# Altium footprint library PBL - THD Packages.PcbLib: 160 footprints (part 9 of 10)
Each footprint in its own frame and in the unit in brackets; x right, y up, seen from the top. Pads: shape width x height; smd on the part's side, far side on the other; paste and mask are expansions set on the pad; w line width, h text height; cw(c..) or ccw(c..) is an arc to the next point about the centre after c.
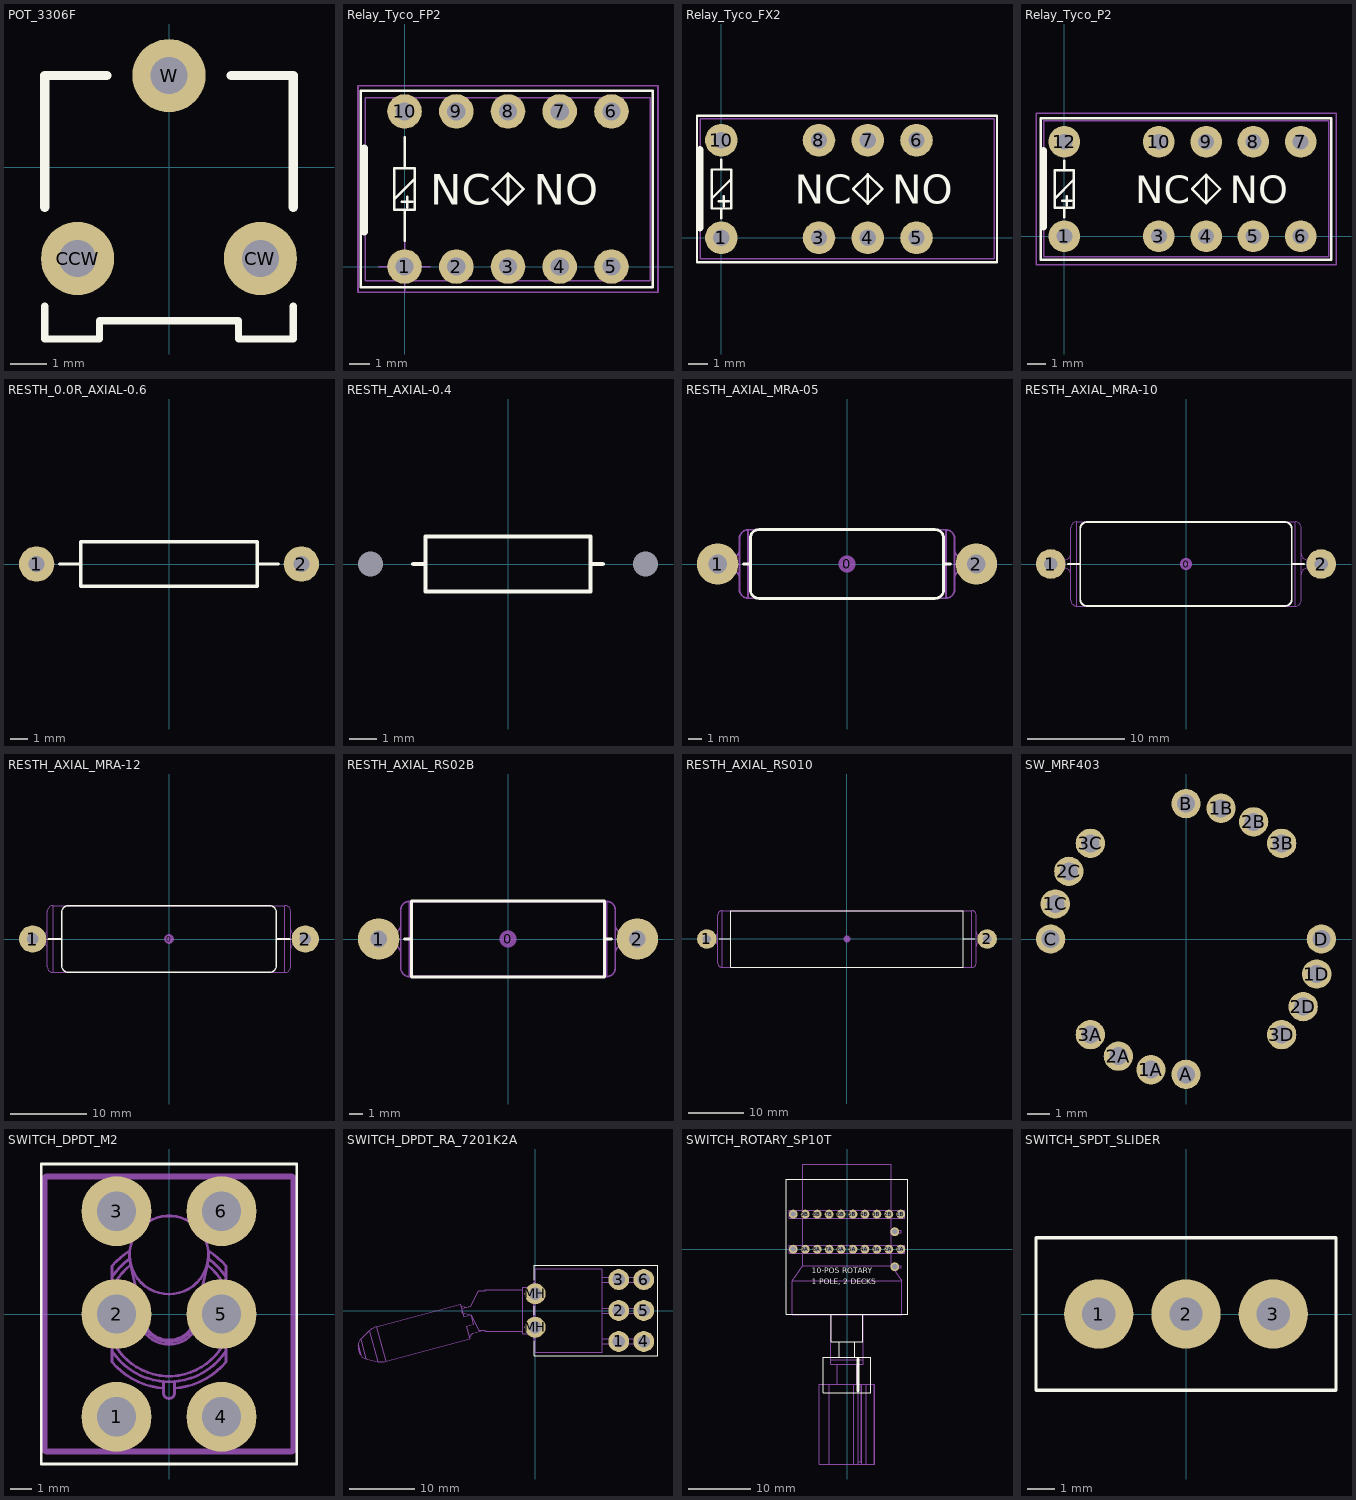
[diagram p8: the footprints below, top view; thin cyan lines are the x and y axes]

## POT_3306F [mm]
pads (3):
  round 2 hole 1.016: CCW(-2.5,-2.5) CW(2.5,-2.5) W(0,2.5)
Top Overlay:
  lines w0.2: -3.4,-3.8 -3.4,-4.7 -1.9,-4.7 -1.9,-4.2 0,-4.2 1.9,-4.2 1.9,-4.7 3.4,-4.7 3.4,-3.8
  lines w0.254: -3.4,-1.1 -3.4,2.5 -1.7,2.5 ; 1.7,2.5 3.4,2.5 3.4,-1.1
3D body: height 7.62, standoff -3.04, extent -3.405,-4.876 3.405,3.79

## Relay_Tyco_FP2 [mm] "Tyco FP2 DPDT 5VDC Relay"
height 5.1
pads (10):
  round 1.7 hole 0.889: 1(0,0) 2(2.54,0) 3(5.08,0) 4(7.62,0) 5(10.16,0) 6(10.16,7.62) 7(7.62,7.62) 8(5.08,7.62) 9(2.54,7.62) 10(0,7.62)
Top Overlay:
  lines w0.127: -0.508,3.302 0.508,4.318 ; -0.127,3.175 0.381,3.175 ; 0,1.27 0,2.794 ; 0,4.826 0,6.35 ; 0.127,2.921 0.127,3.429 ; 5.08,3.048 5.842,3.81 5.08,4.572 ; 5.08,3.048 5.08,4.572 ; 5.08,3.048 4.318,3.81 5.08,4.572 ; -2.159,-1.016 12.192,-1.016 12.192,8.636 -2.159,8.636 -2.159,-1.016 ; -0.508,2.794 -0.508,4.826 0.508,4.826 0.508,2.794 -0.508,2.794
  lines w0.381: -1.981,1.727 -1.981,5.817
  text "NO" at 6.35,3.048 h1.5
  text "NC" at 1.27,3.048 h1.5
13 - 3D Top Side:
  lines w0.076: -1.93,-0.7 -1.93,8.3 12.07,8.3 12.07,-0.7 -1.93,-0.7
15 - Top Courtyards:
  lines w0.076: -1.27,0 1.27,0 ; 0,-1.27 0,1.27 ; -2.286,-1.27 -2.286,8.89 12.446,8.89 12.446,-1.27 -2.286,-1.27
3D body: height 5, standoff 0.3, extent -1.93,-0.7 12.07,8.3

## Relay_Tyco_FX2 [mm] "Tyco FX2 DPDT 5VDC Relay"
height 10.7
pads (8):
  round 1.7 hole 0.85: 1(0,0) 3(5.08,0) 4(7.62,0) 5(10.16,0) 6(10.16,5.08) 7(7.62,5.08) 8(5.08,5.08) 10(0,5.08)
Top Overlay:
  lines w0.127: -0.508,2.032 0.508,3.048 ; -0.127,1.905 0.381,1.905 ; 0,1.016 0,1.524 ; 0,3.556 0,4.064 ; 0.127,1.651 0.127,2.159 ; 7.62,1.778 8.382,2.54 7.62,3.302 ; 7.62,1.778 7.62,3.302 ; 7.62,1.778 6.858,2.54 7.62,3.302 ; -1.27,-1.27 14.351,-1.27 14.351,6.35 -1.27,6.35 -1.27,-1.27 ; -0.508,1.524 -0.508,3.556 0.508,3.556 0.508,1.524 -0.508,1.524
  lines w0.381: -1.118,0.508 -1.118,4.597
  text "NO" at 8.89,1.778 h1.5
  text "NC" at 3.81,1.778 h1.5
13 - 3D Top Side:
  lines w0.076: -1.1,-1.1 14.2,-1.1 14.2,6.2 -1.1,6.2 -1.1,-1.1
3D body: height 10.7, standoff 0, extent -1.1,-1.1 14.2,6.2

## Relay_Tyco_P2 [mm] "Tyco P2 DPDT 5VDC V23079 Relay"
height 10
pads (10):
  round 1.7 hole 0.85: 1(0,0) 3(5.08,0) 4(7.62,0) 5(10.16,0) 6(12.7,0) 7(12.7,5.08) 8(10.16,5.08) 9(7.62,5.08) 10(5.08,5.08) 12(0,5.08)
Top Overlay:
  lines w0.127: -0.508,2.032 0.508,3.048 ; -0.127,1.905 0.381,1.905 ; 0,1.016 0,1.524 ; 0,3.556 0,4.064 ; 0.127,1.651 0.127,2.159 ; 7.62,1.778 6.858,2.54 7.62,3.302 ; 7.62,1.778 7.62,3.302 ; 7.62,1.778 8.382,2.54 7.62,3.302 ; -1.27,-1.27 -1.27,6.35 14.351,6.35 14.351,-1.27 -1.27,-1.27 ; -0.508,1.524 0.508,1.524 0.508,3.556 -0.508,3.556 -0.508,1.524
  lines w0.381: -1.118,0.508 -1.118,4.597
  text "NC" at 3.81,1.778 h1.5
  text "NO" at 8.89,1.778 h1.5
13 - 3D Top Side:
  lines w0.076: -1.1,-1.1 -1.1,6.2 14.2,6.2 14.2,-1.1 -1.1,-1.1
15 - Top Courtyards:
  lines w0.076: -0.762,0 0.762,0 ; 0,-0.762 0,0.762 ; -1.524,-1.524 -1.524,6.604 14.6,6.604 14.6,-1.524 -1.524,-1.524
3D body: height 9.82, standoff -0.58, extent -0.9,-1.14 13.6,6.26
3D body: height 10.7, standoff 0, extent -1.1,-1.1 14.2,6.2

## RESTH_0.0R_AXIAL-0.6 [mil] "Axial Resistor 0 Ohm, Thru-Hole; 2 Leads; 0.6 in Pin Spacing"
height 102.36
pads (2):
  round 80 hole 36: 1(-300,0) 2(300,0)
Top Overlay:
  lines w7.87: -248.03,0 -200,0 ; 200,0 248.03,0 ; -200,-50 200,-50 200,50 -200,50 -200,-50
3D body: height 102.76, standoff -98.43, extent -311.8,-51.57 311.82,51.58

## RESTH_AXIAL-0.4 [mil]
height 80
pads (2):
  round 0 / inner round 0 / far side round 100 hole 36 unplated: 1(-200,0) 2(200,0)
Top Overlay:
  lines w6: -137.8,0 -120,0 ; 120,0 137.8,0 ; -120,-40 120,-40 120,40 -120,40 -120,-40
3D body: height 102.23, standoff -100, extent -211.81,-50.27 211.81,50.27

## RESTH_AXIAL_MRA-05 [mil] "MRA-05 Axial Resistor Thru-Hole; 2 Leads"
height 198
pads (3):
  round 50 on Mech15: 0(0,0)
  round 120 hole 54: 1(-375,0) 2(375,0)
Top Overlay:
  lines w7.87: -300,0 -280,0 ; 280,0 300,0 ; -280,-75 ccw(c-255,-75) -255,-100 255,-100 ccw(c255,-75) 280,-75 280,75 ccw(c255,75) 255,100 -255,100 ccw(c-255,75) -280,75 -280,-75
13 - 3D Top Side:
  lines w5: -337,-16.89 -337,17 ; -312,-42 ccw(c-337,-42) -337,-17 -375,-17 cw(c-375,0) -375,17 -337,17 ; -312,42 cw(c-337,42) -337,17 ; 312,-42 cw(c337,-42) 337,-17 ; 312,42 ccw(c337,42) 337,17 375,17 cw(c375,0) 375,-17 337,-17 ; 337,16.89 337,-17 ; -341,-16.98 -341,-16.52 -341,-15.46 -341,-13.85 -341,-11.73 -341,-9.19 -341,-6.32 -341,-3.22 -341,0 -341,3.22 -341,6.32 -341,9.19 -341,11.73 -341,13.85 -341,15.46 -341,16.52 -341,16.98 ; -341,-17 -341,-16.98 ; -341,16.98 -341,17 ; -287,-99 cw(c-287,-74) -312,-74 -312,74 cw(c-287,74) -287,99 ; -287,-99 -287,99 ; -287,-99 287,-99 ; -287,99 287,99 ; 287,-99 ccw(c287,-74) 312,-74 312,74 ccw(c287,74) 287,99 ; 287,-99 287,99 ; 341,-16.98 341,-16.52 341,-15.46 341,-13.85 341,-11.73 341,-9.19 341,-6.32 341,-3.22 341,0 341,3.22 341,6.32 341,9.19 341,11.73 341,13.85 341,15.46 341,16.52 341,16.98 ; 341,-17 341,-16.98 ; 341,16.98 341,17
3D body: height 197.22, standoff -100, extent -391.99,-98.8 392.01,98.81

## RESTH_AXIAL_MRA-10 [mil] "MRA-10 Axial Resistor Thru-Hole; 2 Leads"
height 343
pads (3):
  round 50 on Mech15: 0(0,0)
  round 120 hole 54: 1(-550,0) 2(550,0)
Top Overlay:
  lines w7.87: -480,0 -430,0 ; 430,0 480,0 ; -430,-145 ccw(c-405,-145) -405,-170 405,-170 ccw(c405,-145) 430,-145 430,145 ccw(c405,145) 405,170 -405,170 ccw(c-405,145) -430,145 -430,-145
13 - 3D Top Side:
  lines w5: -516,-17 -516,17 ; -493.5,-16.89 -493.5,17 ; -468.5,-42 ccw(c-493.5,-42) -493.5,-17 -550,-17 cw(c-550,0) -550,17 -493.5,17 ; -468.5,42 cw(c-493.5,42) -493.5,17 ; 468.5,-42 cw(c493.5,-42) 493.5,-17 ; 468.5,42 ccw(c493.5,42) 493.5,17 550,17 cw(c550,0) 550,-17 493.5,-17 ; 493.5,16.89 493.5,-17 ; 516,-17 516,17 ; -443.5,-171.5 cw(c-443.5,-146.5) -468.5,-146.5 -468.5,146.5 cw(c-443.5,146.5) -443.5,171.5 ; -443.5,-171.5 -443.5,171.5 ; -443.5,-171.5 443.5,-171.5 ; -443.5,171.5 443.5,171.5 ; 443.5,-171.5 ccw(c443.5,-146.5) 468.5,-146.5 468.5,146.5 ccw(c443.5,146.5) 443.5,171.5 ; 443.5,-171.5 443.5,171.5
3D body: height 341.65, standoff -100, extent -566.99,-171.16 567,171.17

## RESTH_AXIAL_MRA-12 [mil] "MRA-12 Axial Resistor Thru-Hole; 2 Leads"
height 343
pads (3):
  round 50 on Mech15: 0(0,0)
  round 140 hole 60: 1(-700,0) 2(700,0)
Top Overlay:
  lines w7.87: -620,0 -550,0 ; 550,0 620,0 ; -550,-139.99 ccw(c-520,-139.99) -520,-169.99 520,-170 ccw(c519.99,-139.99) 549.99,-139.99 550,140 ccw(c519.99,140) 519.99,170 -520,170 ccw(c-520,140) -550,140 -550,-140
13 - 3D Top Side:
  lines w5: -666,-17 -666,17 ; -625,-47 ccw(c-655,-47) -655,-17 ; -625,47 cw(c-655,47) -655,17 ; 625,-47 cw(c655,-47) 655,-17 ; 625,47 ccw(c655,47) 655,17 ; 666,-17 666,17 ; -655,-17 -655,17 ; -655,-17 -700,-17 cw(c-700,0) -700,17 -655,17 ; -595,-171.5 cw(c-595,-141.5) -625,-141.5 -625,141.5 cw(c-595,141.5) -595,171.5 ; -595,-171.5 -595,171.5 ; -595,-171.5 595,-171.5 ; -595,171.5 595,171.5 ; 595,-171.5 ccw(c595,-141.5) 625,-141.5 625,141.5 ccw(c595,141.5) 595,171.5 ; 595,-171.5 595,171.5 ; 655,-17 655,17 ; 655,-17 700,-17 ccw(c700,0) 700,17 655,17
3D body: height 341.65, standoff -100, extent -717,-171.15 717,171.17

## RESTH_AXIAL_RS02B [mil] "Axial Resistor Thru-Hole; 2 Leads"
height 218
pads (3):
  round 50 on Mech15: 0(0,0)
  round 120 hole 48: 1(-375,0) 2(375,0)
Top Overlay:
  lines w7.87: -300,0 -280,0 ; 280,0 300,0 ; -280,-110 280,-110 280,110 -280,110 -280,-110
13 - 3D Top Side:
  lines w5: -341,-17 -341,17 ; -311,-42 ccw(c-336,-42) -336,-17 ; -311,42 cw(c-336,42) -336,17 ; 311,-42 cw(c336,-42) 336,-17 ; 311,42 ccw(c336,42) 336,17 ; 341,-17 341,17 ; -336,-17 -336,17 ; -336,-17 -375,-17 cw(c-375,0) -375,17 -336,17 ; -286,-109 cw(c-286,-84) -311,-84 -311,84 cw(c-286,84) -286,109 ; -286,-109 -286,109 ; -286,-109 286,-109 ; -286,109 286,109 ; 286,-109 ccw(c286,-84) 311,-84 311,84 ccw(c286,84) 286,109 ; 286,-109 286,109 ; 336,-17 336,17 ; 336,-17 375,-17 ccw(c375,0) 375,17 336,17
3D body: height 217.14, standoff -100, extent -392,-108.78 392,108.79

## RESTH_AXIAL_RS010 [mil] "Axial Resistor Thru-Hole; 2 Leads"
height 406
pads (3):
  round 50 on Mech15: 0(0,0)
  round 140 hole 60: 1(-1000,0) 2(1000,0)
Top Overlay:
  lines w7.87: -910,0 -830,0 ; 830,0 910,0 ; -830,-200 -830,200 830,200 830,-200 -830,-200
13 - 3D Top Side:
  lines w5: -958,-21 -958,21 ; -921,-51 ccw(c-951,-51) -951,-21 ; -921,51 cw(c-951,51) -951,21 ; 921,-51 cw(c951,-51) 951,-21 ; 921,51 ccw(c951,51) 951,21 ; 958,-21 958,21 ; -951,-21 -1000,-21 cw(c-1000,0) -1000,21 -951,21 ; -951,-21 -951,21 ; -891,-203 cw(c-891,-173) -921,-173 -921,173 cw(c-891,173) -891,203 ; -891,-203 891,-203 ; -891,-203 -891,203 ; -891,203 891,203 ; 891,-203 ccw(c891,-173) 921,-173 921,173 ccw(c891,173) 891,203 ; 891,-203 891,203 ; 951,-21 1000,-21 ccw(c1000,0) 1000,21 951,21 ; 951,-21 951,21
3D body: height 404.4, standoff -100, extent -1020.99,-202.59 1021,202.61

## SW_MRF403 [mm]
height 8.2
pads (16):
  round 1.3 hole 0.8: 1A(-1.553,-5.796) 1B(1.553,5.796) 1C(-5.796,1.553) 1D(5.796,-1.553) 2A(-3,-5.196) 2B(3,5.196) 2C(-5.196,3) 2D(5.196,-3) 3A(-4.243,-4.243) 3B(4.243,4.243) 3C(-4.243,4.243) 3D(4.243,-4.243) A(0,-6) B(0,6) C(-6,0) D(6,0)
3D body: height 8.2, standoff -3.51, extent -9.896,-9.896 9.896,9.896

## SWITCH_DPDT_M2 [mm] "NKK M2 Series DPDT Switch with 03 pin option"
height 28.448
pads (6):
  round 3.2 hole 1.8: 1(-2.4,-4.7) 2(-2.4,0) 3(-2.4,4.7) 4(2.4,-4.7) 5(2.4,0) 6(2.4,4.7)
Top Overlay:
  lines w0.127: -5.842,-6.858 -5.842,6.858 5.842,6.858 5.842,-6.858 -5.842,-6.858
13 - 3D Top Side:
  lines w0.127: -5.716,-6.313 -5.626,-6.223 ; -5.716,6.313 -5.626,6.223 ; -2.604,-1.681 ccw(c0,0) 2.604,-1.681 ; -2.604,-1.147 ccw(c0,0) 2.604,-1.147 ; -2.604,1.147 cw(c0,0) -1.752,2.241 ; -2.604,1.681 cw(c0,0) -1.801,2.522 ; -1.795,2.892 ccw(c0,0) -2.604,2.192 -2.604,-2.192 ccw(c0,0) -0.254,-3.394 ; -1.766,2.302 -1.191,-0.254 ccw(c0,0.033) 1.191,-0.254 1.766,2.302 ; -1.338,0.401 ccw(c0,0) 1.338,0.401 ; -1.267,0.085 ccw(c0,0) 1.267,0.085 ; -0.254,-3.088 -0.254,-3.607 ccw(c0,-3.607) 0.254,-3.607 0.254,-3.088 ; 0.254,-3.394 ccw(c0,0) 2.604,-2.192 2.604,2.192 ccw(c0,0) 1.795,2.892 ; 1.752,2.241 cw(c0,0) 2.604,1.147 ; 1.801,2.522 cw(c0,0) 2.604,1.681 ; 5.716,-6.313 5.626,-6.223 ; 5.716,6.313 5.626,6.223 ; -5.626,-6.223 5.626,-6.223 ; -5.626,-6.223 -5.626,6.223 ; -5.626,6.223 5.626,6.223 ; 5.626,-6.223 5.626,6.223 ; -5.753,-6.223 ccw(c-5.626,-6.223) -5.626,-6.35 5.626,-6.35 ccw(c5.626,-6.223) 5.753,-6.223 5.753,6.223 ccw(c5.626,6.223) 5.626,6.35 -5.626,6.35 ccw(c-5.626,6.223) -5.753,6.223 -5.753,-6.223 ; -1.808,2.679 cw(c0,2.679) 1.808,2.679 cw(c0,2.715) -1.808,2.679
3D body: height 29.15, standoff -4.8, extent -5.753,-6.35 5.753,6.35

## SWITCH_DPDT_RA_7201K2A [mil] "DPDT Switch Right-angle PCB mount - C&K 7201K2A"
height 450
pads (8):
  round 125 hole 73: 1(500,-185) 2(500,0) 3(500,185) 4(650,-185) 5(650,0) 6(650,185) MH(0,-100) MH(0,100)
Top Overlay:
  lines w5: -5,-180 -5,-270 735,-270 735,270 -5,270 -5,180 ; -5,-25 -5,25
13 - 3D Top Side:
  lines w1.97: -445.94,27.92 -415.18,18.2 -384.21,26.59 ; -395.27,-159.34 -373.61,-135.45 -309.44,-118.08 ; -75,-125 -298.04,-125 -298.04,-118.08 -338.46,-118.08 -385,-25 ; -75,125 -298.04,125 -298.04,118.08 -338.46,118.08 -385,25 -435,12.5 -435,-12.5 -385,-25 ; -10,-145 0,-145 ; -10,-140 -75,-140 -75,140 -10,140 ; -10,145 0,145 ; 0,-170 -10,-170 -10,170 0,170 ; 400,-200 675,-200 675,-170 400,-170 ; 400,-15 675,-15 675,15 400,15 ; 400,170 675,170 675,200 400,200 ; 610,-200 610,-170 ; 610,-15 610,15 ; 610,170 610,200 ; -1060.2,-211.44 ccw(c-960.2,-211.71) -1046.43,-262.36 ; -1060.2,-211.44 -1060.19,-208.22 ; -1060.2,-211.44 -1046.43,-262.36 ; -1060.19,-208.22 cw(c-1010.19,-208.35) -1044.77,-172.23 ; -1060.19,-208.22 -1044.79,-265.13 ; -1046.43,-262.36 -1044.79,-265.13 ; -1044.79,-265.13 ccw(c-1001.68,-239.81) -1013.33,-288.43 ; -1044.77,-172.24 -992.57,-122.27 ; -1044.77,-172.24 -1013.33,-288.43 ; -1013.33,-288.43 -943.06,-305.26 ; -992.57,-122.27 cw(c-923.42,-194.5) -949.54,-97.97 ; -992.57,-122.27 -943.06,-305.26 ; -949.54,-97.97 -448.55,37.57 -428.44,-36.75 -385,-25 ; -949.54,-97.97 -893.64,-304.55 ; -943.06,-305.26 ccw(c-919.76,-208.02) -893.64,-304.55 ; -893.64,-304.55 -392.66,-169 -412.77,-94.67 -369.33,-82.92 -385,-25 ; 0,-250 400,-250 400,250 0,250 0,-250
3D body: height 450, standoff -125, extent -1060.14,-308 675,250.01

## SWITCH_ROTARY_SP10T [mil] "Grayhill 71AF style 2-deck single pole 10-position rotary switch"
height 712.6
pads (22):
  round 56 hole 32: 1A(337.5,0) 1B(337.5,220) 2A(262.5,0) 2B(262.5,220) 3A(187.5,0) 3B(187.5,220) 4A(112.5,0) 4B(112.5,220) 5A(37.5,0) 5B(37.5,220) 6A(-37.5,0) 6B(-37.5,220) 7A(-112.5,0) 7B(-112.5,220) 8A(-187.5,0) 8B(-187.5,220) 9A(-262.5,0) 9B(-262.5,220) 10A(-337.5,0) 10B(-337.5,220) C1A(300,-110) C1B(300,110)
Top Overlay:
  lines w5: -100,-410 -100,-580 100,-580 100,-410 ; -50,-580 -50,-680 50,-680 50,-580 ; -380,-410 380,-410 380,440 -380,440 -380,-410 ; -150,-900 150,-900 150,-680 -150,-680 -150,-900
  lines w20: 70,-890 70,-690
  text "10-POS ROTARY" at -220,-150 h35
  text "1 POLE, 2 DECKS" at -220,-220 h35
13 - 3D Top Side:
  lines w5: -343.5,-25 -343.5,25 ; -343.5,195 -343.5,245 ; -278.5,-25 -278.5,-104.17 ; -278.5,25 -278.5,195 ; -278.5,245 -278.5,535 278.5,535 278.5,245 ; -112.06,-1349 -112.06,-849 ; -101.5,-694 101.5,-694 ; -101.5,-412 -101.5,-724 101.5,-724 101.5,-412 ; -62.5,-849 -62.5,-724 ; 43.85,-1349 43.85,-849 ; 62.5,-849 62.5,-724 ; 70,-1349 70,-849 ; 70,-1334 89.14,-1334 89.14,-849 ; 93.78,-1349 93.78,-849 ; 119.93,-1349 119.93,-849 ; 169.67,-1349 169.67,-849 ; 278.5,-102.5 278.5,-25 ; 278.5,25 278.5,102.5 ; 278.5,117.5 278.5,195 ; 287.83,-117.5 343.5,-197 ; 343.5,-25 343.5,25 ; 343.5,195 343.5,245 ; -343.5,-197 343.5,-197 ; -343.5,-197 -278.5,-104.17 ; -343.5,-197 -343.5,-412 343.5,-412 343.5,-197 ; -278.5,-104.17 275.61,-104.17 ; 275.61,-104.17 275.61,-102.5 340,-102.5 340,-117.5 285.04,-117.5 275.61,-104.17 ; -362.5,-25 -362.5,25 362.5,25 362.5,-25 -362.5,-25 ; -362.5,195 -362.5,245 362.5,245 362.5,195 -362.5,195 ; -175,-1349 175,-1349 175,-849 -175,-849 -175,-1349 ; 275.61,102.5 340,102.5 340,117.5 275.61,117.5 275.61,102.5
3D body: height 711.5, standoff -156, extent -362.49,-1348.99 362.51,535

## SWITCH_SPDT_SLIDER [mil] "TE Connectivity SLS121PC04 SPDT slider"
height 396
pads (3):
  round 100 hole 48: 1(-126,0) 2(0,0) 3(126,0)
Top Overlay:
  lines w5: -216.54,-110.24 216.54,-110.24 216.54,110.24 -216.54,110.24 -216.54,-110.24
3D body: height 394, standoff -170, extent -216.49,-109.99 216.51,110.01